# Altium footprint library FPGAENTRY.PcbLib: 36 footprints (part 3 of 3)
Each footprint in its own frame and in the unit in brackets; x right, y up, seen from the top. Pads: shape width x height; smd on the part's side, far side on the other; paste and mask are expansions set on the pad; w line width, h text height; cw(c..) or ccw(c..) is an arc to the next point about the centre after c.
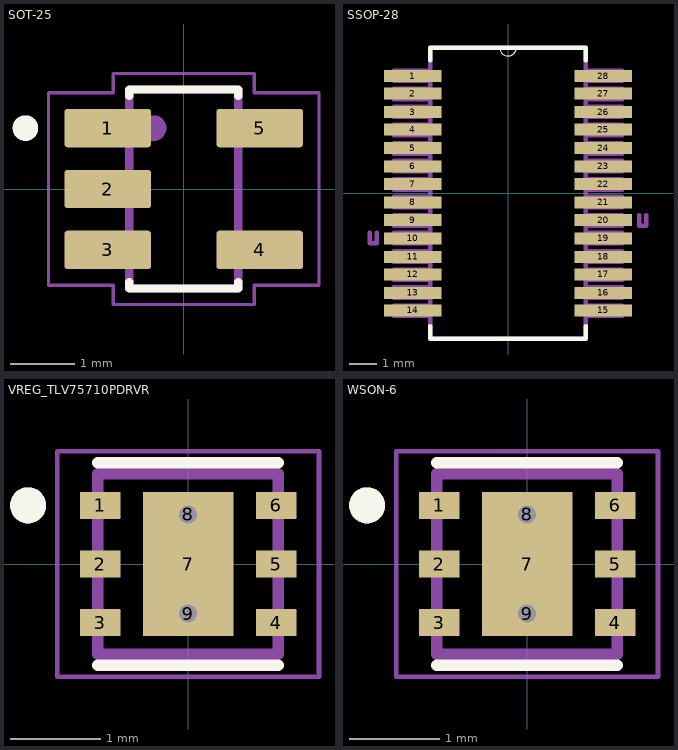
[diagram p2: the footprints below, top view; thin cyan lines are the x and y axes]

## SOT-25 [mm]
pads (5):
  rrect15% 1.35x0.6 smd: 1(-1.185,0.95) 2(-1.185,0) 3(-1.185,-0.95) 4(1.185,-0.95) 5(1.185,0.95)
Top Overlay:
  circle w0.2: c-2.469,0.95 r0.1
  lines w0.127: -0.85,-1.45 -0.85,-1.55 0.85,-1.55 0.85,-1.45 ; -0.85,1.45 -0.85,1.55 0.85,1.55 0.85,1.45
Mechanical 13:
  circle w0.2: c-0.469,0.95 r0.1
  lines w0.127: -0.85,-1.55 -0.85,1.55 0.85,1.55 0.85,-1.55 -0.85,-1.55
Mechanical 15:
  lines w0.05: -2.11,-1.5 -1.1,-1.5 -1.1,-1.8 1.1,-1.8 1.1,-1.5 2.11,-1.5 2.11,1.5 1.1,1.5 1.1,1.8 -1.1,1.8 -1.1,1.5 -2.11,1.5 -2.11,-1.5
3D body "step_temp.STEP": height 1.4, standoff 0, extent -1.5,-1.4 1.5,1.4

## SSOP-28 [mil]
pads (28):
  rect 81x17 smd: 1(-135,166) 2(-135,141) 3(-135,115) 4(-135,90) 5(-135,64) 6(-135,38) 7(-135,13) 8(-135,-13) 9(-135,-38) 10(-135,-64) 11(-135,-90) 12(-135,-115) 13(-135,-141) 14(-135,-166) 15(135,-166) 16(135,-141) 17(135,-115) 18(135,-90) 19(135,-64) 20(135,-38) 21(135,-13) 22(135,13) 23(135,38) 24(135,64) 25(135,90) 26(135,115) 27(135,141) 28(135,166)
Top Overlay:
  lines w0: -12,206.08 ccw(c0,206.5) 12,206.92 ; -12,206.08 ccw(c0,206.5) 12,206.92 ; -12,206.08 ccw(c0,206.5) 12,206.92
  lines w6: -110,-188 -110,-206 110,-206 110,-188 ; -110,188 -110,206 -12,206 110,206 110,188
Mechanical 13:
  lines w0: -12,206.08 ccw(c0,206.5) 12,206.92 ; -12,206.08 ccw(c0,206.5) 12,206.92 ; -12,206.08 ccw(c0,206.5) 12,206.92
  lines w6: -196,-56 -196,-71 -186,-71 -186,-56 ; 186,-31 186,-46 196,-46 196,-31 ; -162,-174 -162,-159 -110,-159 -110,-174 -162,-174 ; -162,-148 -162,-133 -110,-133 -110,-148 -162,-148 ; -162,-123 -162,-108 -110,-108 -110,-123 -162,-123 ; -162,-97 -162,-82 -110,-82 -110,-97 -162,-97 ; -162,-71 -162,-56 -110,-56 -110,-71 -162,-71 ; -162,-46 -162,-31 -110,-31 -110,-46 -162,-46 ; -162,-20 -162,-5 -110,-5 -110,-20 -162,-20 ; -162,5 -162,20 -110,20 -110,5 -162,5 ; -162,31 -162,46 -110,46 -110,31 -162,31 ; -162,56 -162,71 -110,71 -110,56 -162,56 ; -162,82 -162,97 -110,97 -110,82 -162,82 ; -162,108 -162,123 -110,123 -110,108 -162,108 ; -162,133 -162,148 -110,148 -110,133 -162,133 ; -162,159 -162,174 -110,174 -110,159 -162,159 ; -110,-206 110,-206 110,206 -12,206 -110,206 -110,-206 ; 110,-174 110,-159 162,-159 162,-174 110,-174 ; 110,-148 110,-133 162,-133 162,-148 110,-148 ; 110,-123 110,-108 162,-108 162,-123 110,-123 ; 110,-97 110,-82 162,-82 162,-97 110,-97 ; 110,-71 110,-56 162,-56 162,-71 110,-71 ; 110,-46 110,-31 162,-31 162,-46 110,-46 ; 110,-20 110,-5 162,-5 162,-20 110,-20 ; 110,5 110,20 162,20 162,5 110,5 ; 110,31 110,46 162,46 162,31 110,31 ; 110,56 110,71 162,71 162,56 110,56 ; 110,82 110,97 162,97 162,82 110,82 ; 110,108 110,123 162,123 162,108 110,108 ; 110,133 110,148 162,148 162,133 110,133 ; 110,159 110,174 162,174 162,159 110,159
  text "*" at -168.29,178.31 h50.09
  text "*" at -168.28,178.3 h50.08
  text "*" at -168.15,178.16 h50.04
3D body "step_temp.STEP": height 78.74, standoff 0, extent -153.54,-201.57 153.54,200

## VREG_TLV75710PDRVR [mm]
pads (9):
  rrect5% 0.45x0.3 smd: 1(-0.975,0.65) 2(-0.975,0) 3(-0.975,-0.65) 4(0.975,-0.65) 5(0.975,0) 6(0.975,0.65)
  rect 1x1.6 smd paste-2: 7(0,0)
  round 0.3 hole 0.2 mask+0: 8(0,0.55) 9(0,-0.55)
Top Overlay:
  circle w0.2: c-1.775,0.65 r0.1
  lines w0.127: -1,-1.12 1,-1.12 ; -1,1.12 1,1.12
Top Paste:
  region: 0.5,0.1 -0.5,0.1 -0.5,0.8 0.5,0.8
  region: 0.5,-0.8 -0.5,-0.8 -0.5,-0.1 0.5,-0.1
Mechanical 13:
  circle w0.2: c-1.775,0.65 r0.1
  lines w0.127: -1,-1 -1,1 1,1 1,-1 -1,-1
Mechanical 15:
  lines w0.05: -1.45,-1.25 1.45,-1.25 1.45,1.25 -1.45,1.25 -1.45,-1.25
3D body "step_temp.STEP": height 0.8, standoff 0, extent -1,-1 1,1

## WSON-6 [mm]
pads (9):
  rrect5% 0.45x0.3 smd: 1(-0.975,0.65) 2(-0.975,0) 3(-0.975,-0.65) 4(0.975,-0.65) 5(0.975,0) 6(0.975,0.65)
  rect 1x1.6 smd paste-2: 7(0,0)
  round 0.3 hole 0.2 mask+0: 8(0,0.55) 9(0,-0.55)
Top Overlay:
  circle w0.2: c-1.775,0.65 r0.1
  lines w0.127: -1,-1.12 1,-1.12 ; -1,1.12 1,1.12
Top Paste:
  region: 0.5,-0.8 -0.5,-0.8 -0.5,-0.1 0.5,-0.1
  region: 0.5,0.1 -0.5,0.1 -0.5,0.8 0.5,0.8
Mechanical 13:
  circle w0.2: c-1.775,0.65 r0.1
  lines w0.127: -1,-1 1,-1 1,1 -1,1 -1,-1
Mechanical 15:
  lines w0.05: -1.45,-1.25 -1.45,1.25 1.45,1.25 1.45,-1.25 -1.45,-1.25
3D body "step_temp.STEP": height 0.8, standoff 0, extent -1,-1 1,1